# Altium footprint library HEADER.PcbLib: 14 footprints
Each footprint in its own frame and in the unit in brackets; x right, y up, seen from the top. Pads: shape width x height; smd on the part's side, far side on the other; paste and mask are expansions set on the pad; w line width, h text height; cw(c..) or ccw(c..) is an arc to the next point about the centre after c.
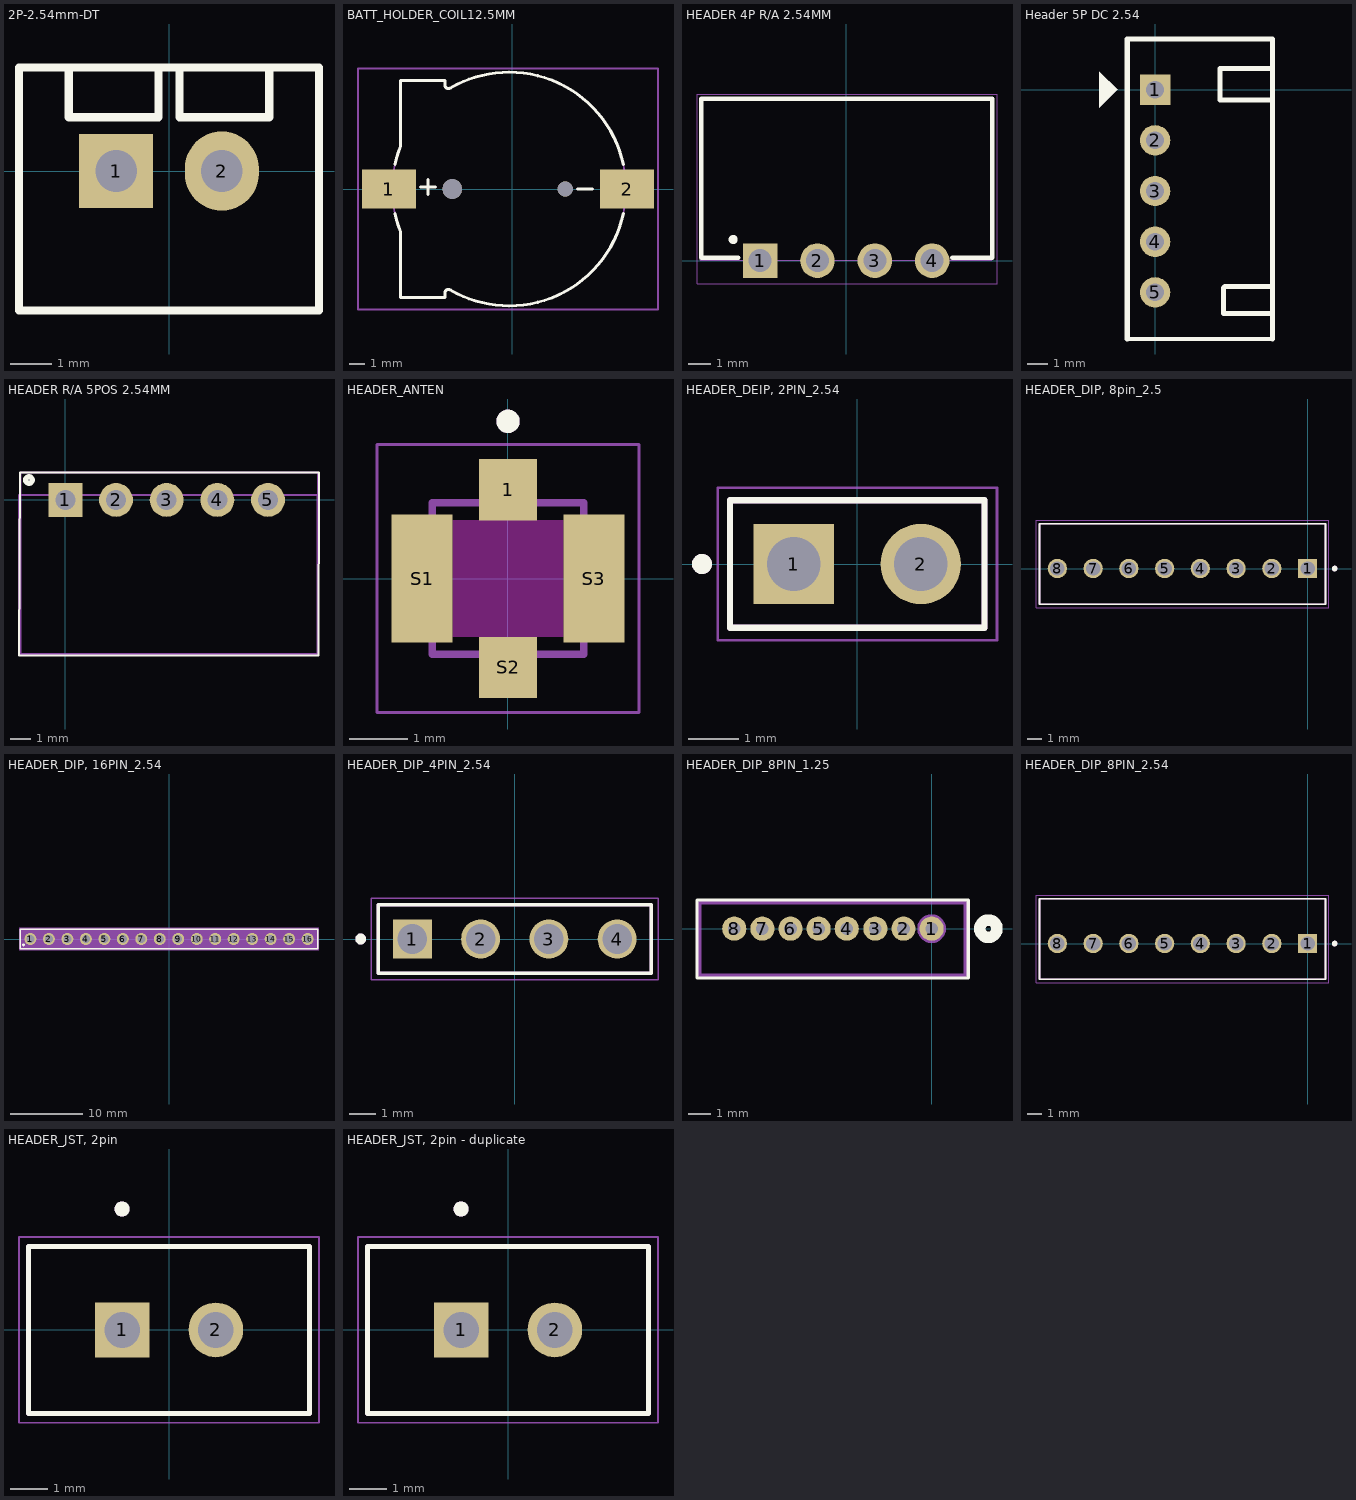
[diagram p0: the footprints below, top view; thin cyan lines are the x and y axes]

## 2P-2.54mm-DT [mil]
pads (2):
  rect 70x70 hole 39.37 unplated: 1(-50,0)
  oval 70x75 hole 39.37 unplated: 2(50,0)
Top Overlay:
  lines w7.87: -95,97 -95,51 -10,51 -10,98 ; 10,98 10,51 95,51 95,97 ; -142,-132 -142,98 142,98 142,-132 -142,-132
Mechanical 13:
  lines w3.94: -140.84,97.17 -140.84,-130.81 141.64,-130.81 141.64,97.35 -140.66,97.35
3D body "JST - XH - Thru (V) - 2Pin - 2.54mm.stp": height 285.97, standoff -116.03, extent -142,-132 142,98

## BATT_HOLDER_COIL12.5MM [mm]
pads (4):
  rect 3.6x2.6 smd: 1(-8.18,0) 2(7.61,0)
  round 1.3 hole 1.3 unplated: ""(-3.98,0)
  round 1 hole 1 unplated: ""(3.51,0)
Top Overlay:
  lines w0.2: -7.78,-1.632 ccw(c-0.484,-0.082) -7.4,-2.876 ; -7.78,1.632 cw(c-0.484,0.082) -7.4,2.876 ; -7.41,-2.85 -7.41,-7.2 -4.46,-7.2 -4.46,-6.88 ; -7.41,2.85 -7.41,7.2 -4.46,7.2 -4.46,6.88 ; -6.088,0.127 -5.088,0.127 ; -5.588,-0.373 -5.588,0.627 ; -4.46,-6.881 cw(c-4.255,-6.87) -4.266,-6.665 cw(c-4.248,-7.014) -4.084,-6.705 ; -4.46,6.881 ccw(c-4.255,6.87) -4.266,6.665 ccw(c-4.248,7.014) -4.084,6.705 ; -4.078,-6.709 ccw(c-0.212,-0.013) -0.212,-7.745 ; -4.078,6.709 cw(c-0.212,0.013) -0.212,7.745 ; -0.21,-7.745 ccw(c-0.21,0) 7.366,-1.61 ; -0.21,7.745 cw(c-0.21,0) 7.366,1.61 ; 4.326,0 5.326,0
the flat projection:
  lines w0.127: -7.899,-1.092 -9.652,-1.092 -9.652,-0.737 -9.652,1.067 -7.899,1.067 ; -7.41,-2.85 -7.41,-7.2 -4.46,-7.2 -4.46,-6.88 ; -7.41,2.85 -7.41,7.2 -4.46,7.2 -4.46,6.88 ; -7.393,-2.893 cw(c-0.231,0) -7.393,2.893 ; -6.088,0.127 -5.088,0.127 ; -5.588,-0.373 -5.588,0.627 ; -4.46,-6.881 cw(c-4.255,-6.87) -4.266,-6.665 cw(c-4.248,-7.014) -4.084,-6.705 ; -4.46,6.881 ccw(c-4.255,6.87) -4.266,6.665 ccw(c-4.248,7.014) -4.084,6.705 ; -4.078,-6.709 ccw(c-0.212,-0.013) -0.212,-7.745 ; -4.078,6.709 cw(c-0.212,0.013) -0.212,7.745 ; -0.21,-7.745 ccw(c-0.21,0) -0.21,7.745 ; 4.334,0 5.334,0 ; 7.468,-1.092 9.22,-1.092 9.22,-0.737 9.22,1.067 7.468,1.067
Mechanical 29:
  lines w0.127: -10.23,-8 -10.23,8 9.66,8 9.66,-8 -10.23,-8
  text "'.Designator'" at -1.6,-0.308 h1.6
3D body "step_temp.STEP": height 4.18, standoff -0.98, extent -9.495,-7.578 9.305,7.56

## HEADER 4P R/A 2.54MM [mm]
pads (4):
  rect 1.53x1.53 / inner round 1.53 / far side rect 1.53x1.53 hole 1.02: 1(-3.81,0)
  round 1.53 hole 1.02: 2(-1.27,0) 3(1.27,0) 4(3.81,0)
Top Overlay:
  circle w0.2: c-5.004,0.94 r0.1
  lines w0.2: -4.775,0.127 -6.426,0.127 -6.426,7.163 6.477,7.163 6.477,0.127 4.699,0.127
the flat projection:
  lines w0.05: -6.452,0.025 6.452,0.025 6.452,7.163 -6.452,7.163 -6.452,0.025
Mechanical 29:
  lines w0.05: -6.604,-1.015 -6.604,7.366 6.68,7.366 6.68,-1.015 -6.604,-1.015
  text "'.Designator'" at -0.787,5.446 h1.27
3D body "RED JST XH 4 PIN CONNECTOR - P 2.54mm - ANGLED.stp": height 5.75, standoff -2.98, extent -6.443,-0.307 6.442,7.153

## Header 5P DC 2.54 [mil]
pads (5):
  rect 60x60 hole 35: 1(0,0)
  round 60 hole 35: 2(0,-100) 3(0,-200) 4(0,-300) 5(0,-400)
Top Overlay:
  region: -110,35.5 -110,-35.5 -75,-0.5 -74,-0.5
  lines w7.87: -55,-492 232,-492
  lines w10: -55,-492 -55,100 232,100 232,-492 ; 231,-388 138,-388 135,-391 135,-442 232,-442 ; 231,-20 128,-20 128,42 232,42

## HEADER R/A 5POS 2.54MM [mm] "SHEADER R/A 5POS 2.54MM"
pads (5):
  rect 1.7x1.7 hole 1: 1(0,0)
  round 1.7 hole 1: 2(2.54,0) 3(5.08,0) 4(7.62,0) 5(10.16,0)
Top Overlay:
  circle w0.254: c-1.825,1 r0.168
  lines w0.1: -2.318,-7.8 -2.284,1.375 12.719,1.375 12.685,-7.8 -2.318,-7.8
Top Assembly:
  lines w0.1: -2.325,-7.725 -2.325,0.25 12.65,0.25 12.65,-7.725 -2.325,-7.725
the flat projection:
  lines w0.1: -2.261,-7.775 -2.261,1.375 12.675,1.375 12.675,-7.775 -2.261,-7.775
  text "+" at 5.207,-5.191 h0.38
Mechanical 29:
  text ".Designator" at 1.95,-5.337 h1.52
3D body "header 2.54mm cong 5p.STEP": height 5.35, standoff -3.03, extent -2.3,-7.689 12.6,0.225

## HEADER_ANTEN [mm]
pads (4):
  rect 1x1.05 smd: 1(0,1.525) S2(0,-1.525)
  rect 1.05x2.2 smd: S1(-1.475,0) S3(1.475,0)
Top Overlay:
  circle w0.2: c0,2.7 r0.1
Keep-Out Layer:
  region: 0.95,-1 -0.95,-1 -0.95,1 0.95,1
  region: 0.95,-1 -0.95,-1 -0.95,1 0.95,1
Mechanical 13:
  circle w0.2: c0,2.7 r0.1
  lines w0.127: -1.3,-1.3 -1.3,1.3 1.3,1.3 1.3,-1.3 -1.3,-1.3
the flat projection:
  lines w0.05: -2.25,-2.3 -2.25,2.3 2.25,2.3 2.25,-2.3 -2.25,-2.3
3D body "step_temp.STEP": height 0.06, standoff -1.25, extent -1.5,-1.55 1.5,1.55

## HEADER_DEIP, 2PIN_2.54 [mm] "M20-9990246"
height 9.64
pads (2):
  rect 1.605x1.605 / inner round 1.605 / far side rect 1.605x1.605 hole 1.07: 1(-1.27,0)
  round 1.605 hole 1.07: 2(1.27,0)
Top Overlay:
  circle w0.2: c-3.1,0 r0.1
  lines w0.127: -2.54,-1.27 2.54,-1.27 2.54,1.27 -2.54,1.27 -2.54,-1.27
Mechanical 13:
  circle w0.2: c-3.1,0 r0.1
  lines w0.127: -2.54,-1.27 2.54,-1.27 2.54,1.27 -2.54,1.27 -2.54,-1.27
the flat projection:
  lines w0.05: -2.79,-1.52 2.79,-1.52 2.79,1.52 -2.79,1.52 -2.79,-1.52
3D body "step_temp.STEP": height 8.74, standoff -3, extent -2.54,-1.27 2.54,1.27

## HEADER_DIP, 8pin_2.5 [mm]
pads (8):
  rect 1.37x1.37 / inner round 1.37 / far side rect 1.37x1.37 hole 1.02: 1(0,0)
  round 1.37 hole 1.02: 2(-2.54,0) 3(-5.08,0) 4(-7.62,0) 5(-10.16,0) 6(-12.7,0) 7(-15.24,0) 8(-17.78,0)
Top Overlay:
  circle w0.2: c1.92,0 r0.1
  lines w0.127: -19.05,-2.54 -19.05,3.18 1.27,3.18 1.27,-2.54 -19.05,-2.54
Mechanical 13:
  circle w0.2: c1.92,0 r0.1
  lines w0.127: -19.05,-2.54 -19.05,3.18 ; -19.05,-2.54 1.27,-2.54 ; -19.05,-2.54 -19.05,3.18 ; -19.05,3.18 1.27,3.18 ; -19.05,3.18 1.27,3.18 ; 1.27,-2.54 1.27,3.18 ; 1.27,-2.54 1.27,3.18
the flat projection:
  lines w0.05: -19.3,-2.79 -19.3,3.43 1.52,3.43 1.52,-2.79 -19.3,-2.79
3D body "step_temp.STEP": height 10.03, standoff -3.94, extent -19.304,-2.286 1.016,3.429

## HEADER_DIP, 16PIN_2.54 [mm] "61301611121"
pads (16):
  round 1.65 hole 1.1: 1(-19.05,0) 2(-16.51,0) 3(-13.97,0) 4(-11.43,0) 5(-8.89,0) 6(-6.35,0) 7(-3.81,0) 8(-1.27,0) 9(1.27,0) 10(3.81,0) 11(6.35,0) 12(8.89,0) 13(11.43,0) 14(13.97,0) 15(16.51,0) 16(19.05,0)
Top Overlay:
  circle w0.2: c-20,-0.8 r0.1
  lines w0.2: -20.42,-1.37 20.42,-1.37 20.42,1.37 -20.42,1.37 -20.42,-1.37
Mechanical 13:
  lines w0.1: -20.32,-1.27 -20.32,1.27 20.32,1.27 20.32,-1.27 -20.32,-1.27
the flat projection:
  region: 20.62,-1.57 -20.62,-1.57 -20.62,1.57 20.62,1.57

## HEADER_DIP_4PIN_2.54 [mm]
pads (4):
  rect 1.45x1.45 / inner round 1.45 / far side rect 1.45x1.45 hole 1.1: 1(-3.81,0)
  round 1.45 hole 1.1: 2(-1.27,0) 3(1.27,0) 4(3.81,0)
Top Overlay:
  circle w0.2: c-5.73,0 r0.1
  lines w0.127: -5.08,-1.27 5.08,-1.27 5.08,1.27 -5.08,1.27 -5.08,-1.27
Mechanical 13:
  circle w0.2: c-5.73,0 r0.1
  lines w0.127: -5.08,-1.27 5.08,-1.27 5.08,1.27 -5.08,1.27 -5.08,-1.27
the flat projection:
  lines w0.05: -5.33,-1.52 5.33,-1.52 5.33,1.52 -5.33,1.52 -5.33,-1.52
3D body "step_temp.STEP": height 7.27, standoff -4.27, extent -5.08,-1.27 5.08,1.27

## HEADER_DIP_8PIN_1.25 [mil]
pads (8):
  round 42 hole 22 mask+4.02: 1(0,0) 2(-49,0) 3(-98,0) 4(-148,0) 5(-197,0) 6(-246,0) 7(-295,0) 8(-344,0)
Top Overlay:
  lines w6: -409,-86 64,-86 64,50 -409,50 -409,-86
  lines w20: 84,0 ccw(c99,0) 114,0 ccw(c99,0) 84,0
Bottom Overlay:
  lines w20: 84,0 ccw(c99,0) 114,0 ccw(c99,0) 84,0
Mechanical 13:
  lines w6: -404,-81 59,-81 59,45 -404,45 -404,-81
  lines w20: -15,0 ccw(c0,0) 15,0 ccw(c0,0) -15,0

## HEADER_DIP_8PIN_2.54 [mm]
pads (8):
  rect 1.37x1.37 / inner round 1.37 / far side rect 1.37x1.37 hole 1.02: 1(0,0)
  round 1.37 hole 1.02: 2(-2.54,0) 3(-5.08,0) 4(-7.62,0) 5(-10.16,0) 6(-12.7,0) 7(-15.24,0) 8(-17.78,0)
Top Overlay:
  circle w0.2: c1.92,0 r0.1
  lines w0.127: -19.05,-2.54 1.27,-2.54 1.27,3.18 -19.05,3.18 -19.05,-2.54
Mechanical 13:
  circle w0.2: c1.92,0 r0.1
  lines w0.127: -19.05,-2.54 -19.05,3.18 ; -19.05,-2.54 1.27,-2.54 ; -19.05,-2.54 -19.05,3.18 ; -19.05,3.18 1.27,3.18 ; -19.05,3.18 1.27,3.18 ; 1.27,-2.54 1.27,3.18 ; 1.27,-2.54 1.27,3.18
the flat projection:
  lines w0.05: -19.3,-2.79 1.52,-2.79 1.52,3.43 -19.3,3.43 -19.3,-2.79
3D body "step_temp.STEP": height 10.03, standoff -3.94, extent -19.05,-2.54 1.27,3.175

## HEADER_JST, 2pin [mm]
pads (2):
  rect 1.458x1.458 / inner round 1.458 / far side rect 1.458x1.458 hole 0.95 mask+0.102: 1(-1.25,0)
  round 1.458 hole 0.95 mask+0.102: 2(1.25,0)
Top Overlay:
  circle w0.2: c-1.25,3.225 r0.1
  lines w0.127: -3.75,-2.225 3.75,-2.225 3.75,2.225 -3.75,2.225 -3.75,-2.225
Mechanical 13:
  circle w0.2: c-1.25,3.225 r0.1
  lines w0.127: -3.75,-2.225 3.75,-2.225 3.75,2.225 -3.75,2.225 -3.75,-2.225
the flat projection:
  lines w0.05: -4,-2.475 4,-2.475 4,2.475 -4,2.475 -4,-2.475
3D body "step_temp.STEP": height 0, standoff -9.65, extent -3.75,-2.286 3.75,2.164

## HEADER_JST, 2pin - duplicate [mm]
pads (2):
  rect 1.458x1.458 / inner round 1.458 / far side rect 1.458x1.458 hole 0.95 mask+0.102: 1(-1.25,0)
  round 1.458 hole 0.95 mask+0.102: 2(1.25,0)
Top Overlay:
  circle w0.2: c-1.25,3.225 r0.1
  lines w0.127: -3.75,-2.225 3.75,-2.225 3.75,2.225 -3.75,2.225 -3.75,-2.225
Mechanical 13:
  circle w0.2: c-1.25,3.225 r0.1
  lines w0.127: -3.75,-2.225 3.75,-2.225 3.75,2.225 -3.75,2.225 -3.75,-2.225
the flat projection:
  lines w0.05: -4,-2.475 4,-2.475 4,2.475 -4,2.475 -4,-2.475
3D body "step_temp.STEP": height 0, standoff -9.65, extent -3.75,-2.286 3.75,2.164